# Altium footprint library PcbLib1.PcbLib: 38 footprints (part 1 of 3)
Each footprint in its own frame and in the unit in brackets; x right, y up, seen from the top. Pads: shape width x height; smd on the part's side, far side on the other; paste and mask are expansions set on the pad; w line width, h text height; cw(c..) or ccw(c..) is an arc to the next point about the centre after c.
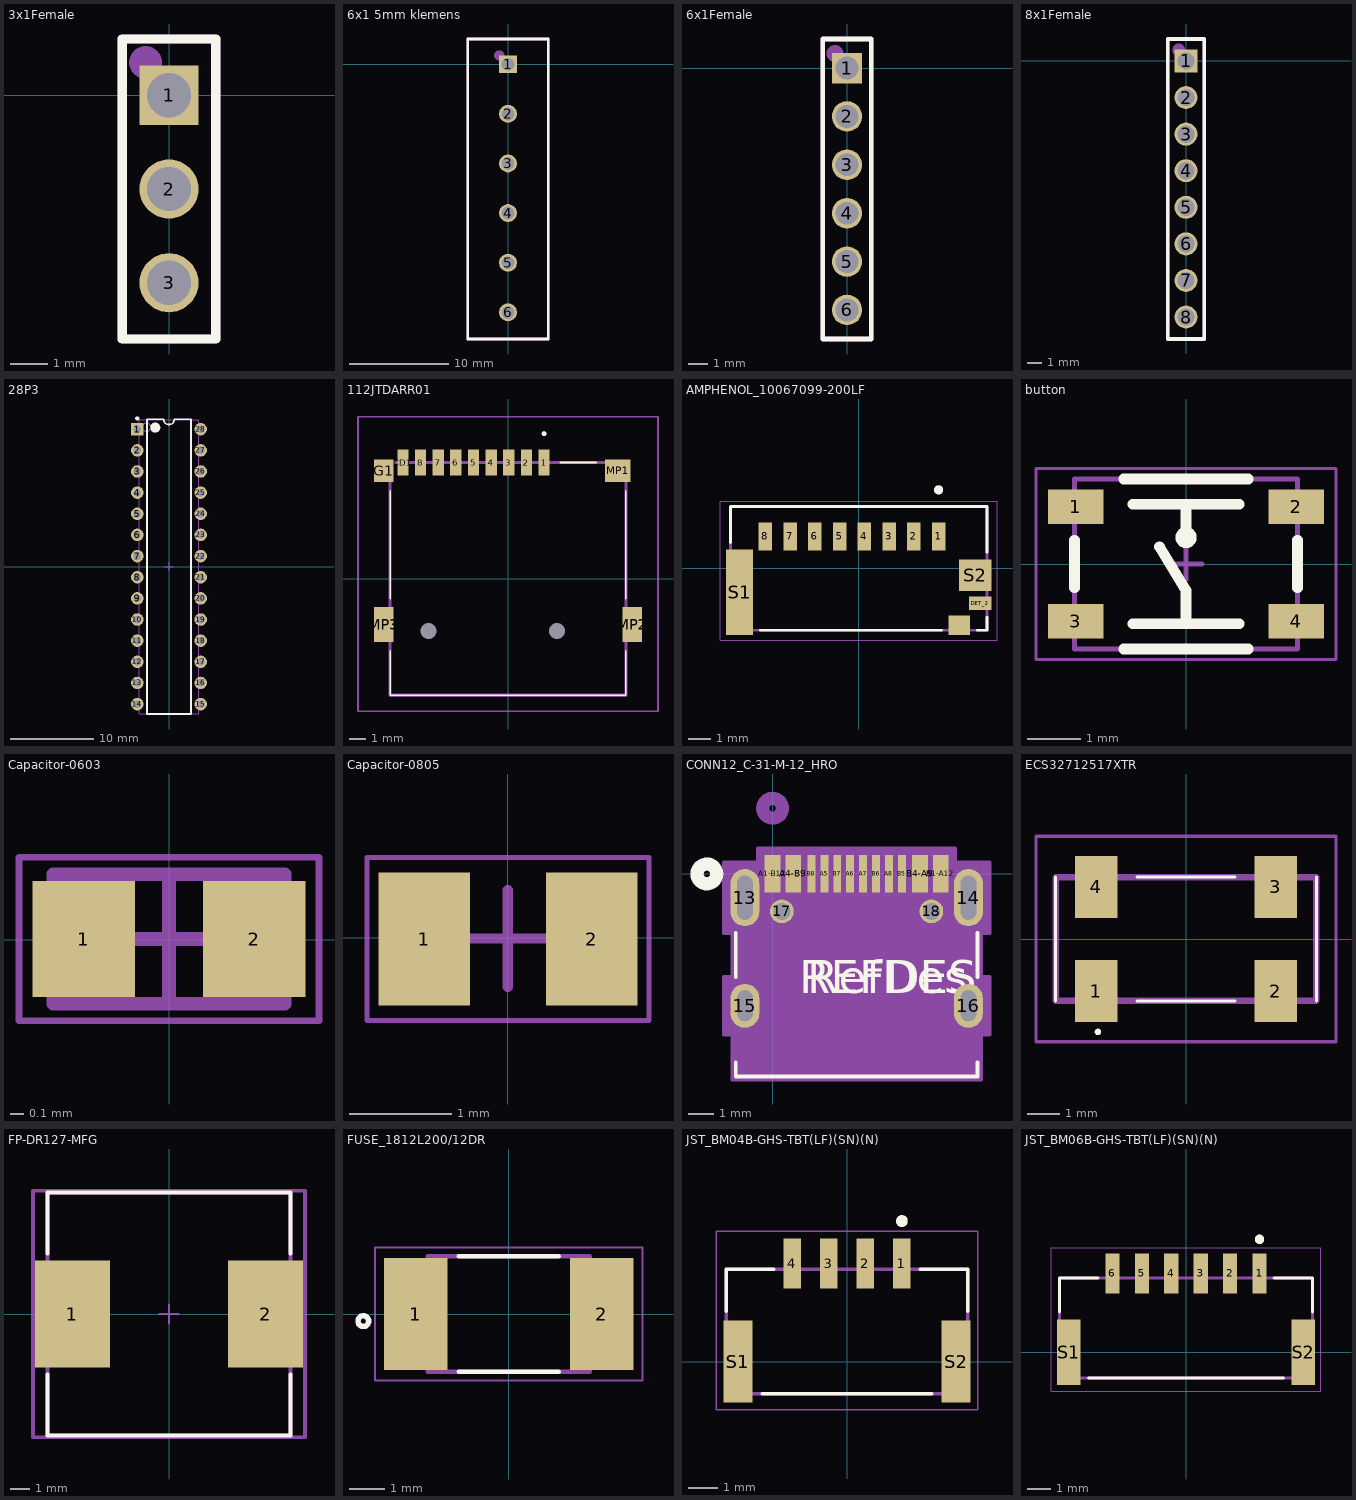
[diagram p0: the footprints below, top view; thin cyan lines are the x and y axes]

## 3x1Female [mm]
pads (3):
  rect 1.6x1.6 hole 1.2: 1(0,0)
  round 1.6 hole 1.2: 2(0,-2.54) 3(0,-5.08)
Top Overlay:
  lines w0.254: -1.27,-6.604 1.27,-6.604 1.27,1.524 -1.27,1.524 -1.27,-6.604
Mechanical 2:
  circle w0.454: c-0.635,0.889 r0.216
  lines w0.254: -1.27,-6.604 1.27,-6.604 1.27,1.524 -1.27,1.524 -1.27,-6.604
  text "String" at 3.175,-6.604 h1.52
3D body "3-Pin Header - Female - 2.54mm.step": height 5.01, standoff -2.99, extent -1.23,-6.6 1.27,1.52
3D body "KY-015.step": height 13.76, standoff 5.26, extent -7.878,-10.922 19.816,5.078

## 6x1 5mm klemens [mm]
pads (6):
  rect 1.8x1.8 hole 1.3: 1(0,0)
  round 1.8 hole 1.3: 2(0,-5) 3(0,-10) 4(0,-15) 5(0,-20) 6(0,-25)
Top Overlay:
  lines w0.254: -4.064,-27.686 4.064,-27.686 4.064,2.54 -4.064,2.54 -4.064,-27.686
Mechanical 2:
  circle w0.52: c-0.889,0.889 r0.255
  lines w0.254: -4.064,-27.686 4.064,-27.686 4.064,2.54 -4.064,2.54 -4.064,-27.686
  text "String" at 6.223,-5.842 h1.52
3D body "Screw Terminal Block 5mm 6-way.step": height 10.01, standoff -1.99, extent -4,-27.65 4,2.5

## 6x1Female [mm]
pads (6):
  rect 1.6x1.6 hole 1.2: 1(0,0)
  round 1.6 hole 1.2: 2(0,-2.54) 3(0,-5.08) 4(0,-7.62) 5(0,-10.16) 6(0,-12.7)
Top Overlay:
  lines w0.254: -1.27,-14.224 -1.27,1.524 1.27,1.524 1.27,-14.224 -1.27,-14.224
Mechanical 2:
  circle w0.454: c-0.635,0.762 r0.216
  lines w0.254: -1.27,-14.224 -1.27,1.524 1.27,1.524 1.27,-14.224 -1.27,-14.224
  text "String" at 3.175,-6.731 h1.52
3D body "User Library-Header_Fem_1X6.step": height 8.51, standoff -3.19, extent -1.27,-14.22 1.27,1.52

## 8x1Female [mm]
pads (8):
  rect 1.6x1.6 hole 1.2: 1(0,0)
  round 1.6 hole 1.2: 2(0,-2.54) 3(0,-5.08) 4(0,-7.62) 5(0,-10.16) 6(0,-12.7) 7(0,-15.24) 8(0,-17.78)
Top Overlay:
  lines w0.254: -1.27,-19.304 -1.27,1.524 1.27,1.524 1.27,-19.304 -1.27,-19.304
Mechanical 2:
  circle w0.454: c-0.508,0.762 r0.216
  lines w0.254: -1.27,-19.304 -1.27,1.524 1.27,1.524 1.27,-19.304 -1.27,-19.304
  text "String" at 3.175,-6.604 h1.52
3D body "User Library-Header _Fem_1X8.step": height 8.51, standoff -3.19, extent -1.27,-19.3 1.27,1.52

## 28P3 [mm] "28-Pin Plastic Dual In-Line Package (PDIP)"
height 4.58
pads (28):
  rect 1.5x1.5 hole 0.9: 1(-3.81,16.51)
  round 1.5 hole 0.9: 2(-3.81,13.97) 3(-3.81,11.43) 4(-3.81,8.89) 5(-3.81,6.35) 6(-3.81,3.81) 7(-3.81,1.27) 8(-3.81,-1.27) 9(-3.81,-3.81) 10(-3.81,-6.35) 11(-3.81,-8.89) 12(-3.81,-11.43) 13(-3.81,-13.97) 14(-3.81,-16.51) 15(3.81,-16.51) 16(3.81,-13.97) 17(3.81,-11.43) 18(3.81,-8.89) 19(3.81,-6.35) 20(3.81,-3.81) 21(3.81,-1.27) 22(3.81,1.27) 23(3.81,3.81) 24(3.81,6.35) 25(3.81,8.89) 26(3.81,11.43) 27(3.81,13.97) 28(3.81,16.51)
Top Overlay:
  circle w0.25: c-3.81,17.81 r0.125
  circle w0.6: c-1.65,16.7 r0.3
  lines w0.2: -2.65,-17.7 -2.65,17.7 -0.635,17.7 ccw(c0,17.7) 0.635,17.7 2.65,17.7 2.65,-17.7 -2.65,-17.7
Mechanical 13:
  circle w0.1: c-2.7,16.75 r0.5
  lines w0.1: -3.6,-17.65 -3.6,17.65 3.6,17.65 3.6,-17.65 -3.6,-17.65
Mechanical 15:
  lines w0.1: -0.5,0 0.5,0 ; 0,-0.5 0,0.5
3D body "ATMEGA328P-PU.stp": height 7.17, standoff -0.9, extent -4.102,-17.463 4.102,17.209
3D body "115-43-328-41-003000.stp": height 2.8, standoff -2.02, extent -5.08,-17.877 5.02,17.623

## 112JTDARR01 [mm]
pads (15):
  rect 0.7x1.6 smd: 1(2.25,7.25) 2(1.15,7.25) 3(0.05,7.25) 4(-1.05,7.25) 5(-2.15,7.25) 6(-3.25,7.25) 7(-4.35,7.25) 8(-5.45,7.25) CD1(-6.55,7.25)
  rect 1.2x1.4 smd: G1(-7.75,6.75)
  round 0.5 hole 1 unplated: MH1(3.05,-3.25) MH2(-4.95,-3.25)
  rect 1.6x1.4 smd: MP1(6.85,6.75)
  rect 1.2x2.2 smd: MP2(7.75,-2.85) MP3(-7.75,-2.85)
Top Overlay:
  lines w0.1: -7.35,-7.25 7.35,-7.25 ; -7.35,-7.25 7.35,-7.25 ; -7.35,-7.25 -7.35,-4.5 -7.35,-7.25 ; 7.35,-7.25 7.35,-4.5 7.35,-7.25 ; -7.35,-1.25 -7.35,5.5 -7.35,-1.25 ; 3.25,7.25 5.5,7.25 3.25,7.25 ; 7.35,-1.25 7.35,5.5 7.35,-1.25
  lines w0.2: 2.25,9 cw(c2.25,9.05) 2.25,9.1 ; 2.25,9 ccw(c2.25,9.05) 2.25,9.1 ; 2.25,9 cw(c2.25,9.05) 2.25,9.1
Mechanical 13:
  lines w0.2: -7.35,-7.25 7.35,-7.25 7.35,7.25 -7.35,7.25 -7.35,-7.25
Mechanical 15:
  lines w0.1: -9.35,-8.25 9.35,-8.25 9.35,10.1 -9.35,10.1 -9.35,-8.25
3D body "112J-TDAR-R01.stp": height 1.86, standoff -0.59, extent -8.05,-7.256 8.05,7.747

## AMPHENOL_10067099-200LF [mm]
height 3.05
pads (12):
  rect 0.6x1.25 smd: 1(3.55,1.425) 2(2.45,1.425) 3(1.35,1.425) 4(0.25,1.425) 5(-0.85,1.425) 6(-1.95,1.425) 7(-3.05,1.425) 8(-4.15,1.425)
  rect 0.95x0.85 smd: DET_1(4.475,-2.525)
  rect 1x0.6 smd: DET_2(5.4,-1.55)
  rect 1.2x3.79 smd: S1(-5.3,-1.055)
  rect 1.45x1.4 smd: S2(5.175,-0.3)
Top Overlay:
  circle w0.2: c3.55,3.5 r0.1
  lines w0.127: -5.7,1.16 -5.7,2.75 5.7,2.75 5.7,0.72 ; -4.38,-2.75 3.68,-2.75 ; 5.27,-2.75 5.7,-2.75 5.7,-2.17
Mechanical 13:
  circle w0.2: c3.55,3.5 r0.1
  lines w0.127: -5.7,-2.75 5.7,-2.75 5.7,2.75 -5.7,2.75 -5.7,-2.75
Mechanical 15:
  lines w0.05: -6.15,-3.2 6.15,-3.2 6.15,3 -6.15,3 -6.15,-3.2
3D body "10067099-200LF--3DModel-STEP-510211.STEP": height 2.65, standoff 0, extent -5.7,-2.75 5.7,2.75

## button [mm] "T-Switch, 4-leads, body 4.2x3.2mm, C&K PTS810 SJM 250 SMTR LFS"
height 2.5
pads (4):
  rect 1.05x0.65 smd mask+0.1: 1(-2.075,1.075) 2(2.075,1.075) 3(-2.075,-1.075) 4(2.075,-1.075)
Top Overlay:
  circle w0.2: c0,0.5 r0.1
  lines w0.2: -2.1,-0.45 -2.1,0.45 ; -1.175,-1.6 1.175,-1.6 ; -1.175,1.6 1.175,1.6 ; -1,-1.125 1,-1.125 ; -1,1.125 1,1.125 ; -0.5,0.325 0,-0.5 0,-1.125 ; 0,0.5 0,1.125 ; 2.1,-0.45 2.1,0.45
Mechanical 13:
  lines w0.1: -2.1,-1.6 -2.1,1.6 2.1,1.6 2.1,-1.6 -2.1,-1.6
Mechanical 15:
  lines w0.05: -2.825,-1.8 -2.825,1.8 2.825,1.8 2.825,-1.8 -2.825,-1.8
  lines w0.1: -0.3,0 0.3,0 ; 0,-0.3 0,0.3
3D body "C&K - PTS810.step": height 2.7, standoff 0, extent -2.287,-1.6 2.288,1.6

## Capacitor-0603 [mm]
pads (2):
  rect 0.75x0.85 smd: 1(-0.627,0.005) 2(0.623,0.005)
Mechanical 13:
  lines w0.1: -0.852,-0.47 -0.852,0.48 0.848,0.48 0.848,-0.47 -0.852,-0.47
Mechanical 15:
  lines w0.05: -1.102,-0.595 -1.102,0.605 1.098,0.605 1.098,-0.595 -1.102,-0.595
  lines w0.1: -0.477,0.005 0.473,0.005 ; -0.002,-0.47 -0.002,0.48
3D body "GRM1885C2A101FA01J.STEP": height 0.9, standoff 0, extent -0.79,-0.39 0.81,0.41

## Capacitor-0805 [mm]
pads (2):
  rect 0.9x1.3 smd: 1(-0.82,-0.01) 2(0.82,-0.01)
Mechanical 15:
  lines w0.05: -1.38,-0.81 -1.38,0.79 1.38,0.79 1.38,-0.81 -1.38,-0.81
  lines w0.1: -0.477,-0.005 0.473,-0.005 ; -0.002,-0.48 -0.002,0.47
3D body "0805YC103J4T2A.STEP": height 0.94, standoff 0, extent -1.025,-0.635 0.985,0.615

## CONN12_C-31-M-12_HRO [mil]
pads (18):
  oval 44x87 / inner round 60 / far side oval 44x87 hole 24 slot 67 at 90 deg paste-99999 mask+0: 13(-42.12,-36.06) 14(298.04,-36.06)
  oval 44x67 / inner round 60 / far side oval 44x67 hole 24 slot 47 at 90 deg paste-99999 mask+0: 15(-42.12,-200.63) 16(298.04,-200.63)
  round 36 / inner round 60 / far side round 36 hole 26 paste-99999 mask-18: 17(14.18,-56.93) 18(241.74,-56.93)
  rect 24x57 smd paste-28.5 mask-28.5: A1-B12(0,0) A4-B9(31.51,0) B1-A12(255.92,0) B4-A9(224.41,0)
  rect 12x57 smd paste-28.5 mask-28.5: A5(78.75,0) A6(118.12,0) A7(137.81,0) A8(177.18,0) B5(196.87,0) B6(157.5,0) B7(98.43,0) B8(59.06,0)
Top Overlay:
  circle w20: c-100,0 r15
  lines w6: -56.04,-286.53 -56.04,-308 311.96,-308 311.96,-286.53 ; -56.04,-156.91 -56.04,-89.78 ; 311.96,-156.91 311.96,-89.78
  text "REFDES" at 40.46,-181.5 h50
  text "RefDes" at 52.96,-181.5 h50
Bottom Overlay:
  circle w20: c-100,0 r15
Mechanical 13:
  circle w20: c0,100 r15
  lines w1: -51.04,-303 -51.04,-10 306.96,-10 306.96,-303 -51.04,-303
  text "RefDes2" at 40.46,-181.5 h50
Mechanical 15:
  region: 316.96,-89.56 330.04,-89.56 330.04,17.44 277.92,17.44 277.92,38.5 -22,38.5 -22,17.44 -74.12,17.44 -74.12,-89.56 -61.04,-89.56 -61.04,-157.13 -74.12,-157.13 -74.12,-244.13 -61.04,-244.13 -61.04,-313 316.96,-313 316.96,-244.13 330.04,-244.13 330.04,-157.13 316.96,-157.13
  lines w6: -74.12,-244.13 -61.04,-244.13 -61.04,-313 316.96,-313 316.96,-244.13 330.04,-244.13 330.04,-157.13 316.96,-157.13 316.96,-89.56 330.04,-89.56 330.04,17.44 277.92,17.44 277.92,38.5 -22,38.5 -22,17.44 -74.12,17.44 -74.12,-89.56 -61.04,-89.56 -61.04,-157.13 -74.12,-157.13 -74.12,-244.13

## ECS32712517XTR [mm]
pads (4):
  rect 1.3x1.9 smd: 1(-2.75,-1.6) 2(2.75,-1.6) 3(2.75,1.6) 4(-2.75,1.6)
Top Overlay:
  lines w0.1: -4,-1.9 -4,1.9 ; -1.5,-1.9 1.5,-1.9 ; -1.5,1.9 1.5,1.9 ; 4,-1.9 4,1.9 ; -2.7,-2.9 ccw(c-2.7,-2.85) -2.7,-2.8 ccw(c-2.7,-2.85) -2.7,-2.9
Mechanical 15:
  lines w0.2: -4,-1.9 -4,1.9 4,1.9 4,-1.9 -4,-1.9
Bottom Assembly:
  lines w0.1: -4.6,-3.15 -4.6,3.15 4.6,3.15 4.6,-3.15 -4.6,-3.15
3D body "ECS-.327-12.5-17X-TR.stp": height 2.6, standoff 0, extent -4,-2.42 4,2.42

## FP-DR127-MFG [mm]
pads (2):
  rect 3.85x5.5 smd paste+0 mask+0: 1(-4.975,0) 2(4.975,0)
Top Overlay:
  lines w0.2: -6.25,-3.125 -6.25,-6.25 6.25,-6.25 6.25,-3.125 ; -6.25,3.125 -6.25,6.25 6.25,6.25 6.25,3.125
Top 3D Body:
  lines w0.2: -6.25,-6.25 6.25,-6.25 6.25,6.25 -6.25,6.25 -6.25,-6.25
Top Courtyard:
  lines w0.2: -7,-6.35 7,-6.35 7,6.35 -7,6.35 -7,-6.35
Top Assembly:
  lines w0.2: -7,-6.35 7,-6.35 7,6.35 -7,6.35 -7,-6.35
  text ".Designator" at 0,0.188 h1
Top Component Center:
  lines w0.1: -0.5,0 0.5,0 ; 0,-0.5 0,0.5
3D body "Ind_COILTRONICS_DR127-330-R_eec.STEP": height 0.25, standoff 0, extent -7,-6.35 7,6.35

## FUSE_1812L200/12DR [mm]
pads (2):
  rect 1.78x3.15 smd: 1(-2.615,0) 2(2.615,0)
Top Overlay:
  circle w0.152: c-4.08,-0.2 r0.15
  lines w0.127: -1.4,-1.62 1.4,-1.62 ; -1.4,1.62 1.4,1.62
Mechanical 13:
  lines w0.127: -2.275,-1.62 2.275,-1.62 2.275,1.62 -2.275,1.62 -2.275,-1.62
Mechanical 15:
  lines w0.05: -3.755,-1.87 3.755,-1.87 3.755,1.87 -3.755,1.87 -3.755,-1.87
3D body "step_temp.STEP": height 1.25, standoff 0, extent -2.275,-1.62 2.275,1.62

## JST_BM04B-GHS-TBT(LF)(SN)(N) [mm]
height 4.05
pads (6):
  rect 0.6x1.7 smd: 1(1.875,3.35) 2(0.625,3.35) 3(-0.625,3.35) 4(-1.875,3.35)
  rect 1x2.8 smd: S1(-3.725,0) S2(3.725,0)
Top Overlay:
  circle w0.2: c1.875,4.8 r0.1
  lines w0.127: -4.125,1.72 -4.125,3.15 -2.5,3.15 ; -2.9,-1.1 2.9,-1.1 ; 2.5,3.15 4.125,3.15 4.125,1.72
Mechanical 13:
  circle w0.2: c1.875,4.8 r0.1
  lines w0.127: -4.125,-1.1 4.125,-1.1 4.125,3.15 -4.125,3.15 -4.125,-1.1
Mechanical 15:
  lines w0.05: -4.475,-1.65 4.475,-1.65 4.475,4.45 -4.475,4.45 -4.475,-1.65
3D body "SM04B-GHS-TB(LF)(SN)---3DModel-STEP-56544.STEP": height 4.35, standoff 0, extent -4.125,-1.15 4.125,3.7

## JST_BM06B-GHS-TBT(LF)(SN)(N) [mm]
height 4.05
pads (8):
  rect 0.6x1.7 smd: 1(3.125,3.35) 2(1.875,3.35) 3(0.625,3.35) 4(-0.625,3.35) 5(-1.875,3.35) 6(-3.125,3.35)
  rect 1x2.8 smd: S1(-4.975,0) S2(4.975,0)
Top Overlay:
  circle w0.2: c3.125,4.8 r0.1
  lines w0.127: -5.375,1.72 -5.375,3.15 -3.75,3.15 ; -4.15,-1.1 4.15,-1.1 ; 3.75,3.15 5.375,3.15 5.375,1.72
Mechanical 13:
  circle w0.2: c3.125,4.8 r0.1
  lines w0.127: -5.375,-1.1 5.375,-1.1 5.375,3.15 -5.375,3.15 -5.375,-1.1
Mechanical 15:
  lines w0.05: -5.725,-1.65 5.725,-1.65 5.725,4.45 -5.725,4.45 -5.725,-1.65
3D body "SM06B-GHS-TB(LF)(SN)--3DModel-STEP-56544.STEP": height 4.07, standoff -0.18, extent -5.375,-1.1 5.375,3.75